# Altium schematic symbol library DS1040-01RT.SchLib: 1 symbol
Pins are listed as number, name and electrical type; pins without a type are passive.

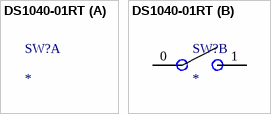
[diagram p0: symbol DS1040-01RT]

## DS1040-01RT
designator SW?
footprint DS1040-1
part B pins: 0, 1 0